# Altium integrated library 0_4R.IntLib: 1 symbol
Pins are listed as number, name and electrical type; pins without a type are passive.

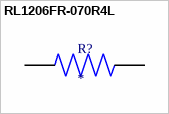
[diagram p0: symbol RL1206FR-070R4L]

## RL1206FR-070R4L
designator R?
400 mOhms Â±1% 0.25W, 1/4W Chip Resistor 1206 (3216 Metric) Automotive AEC-Q200, Current Sense, Moisture Resistant Thick Film; MF: Yageo; MP: RL1206FR-070R4L; SnapEDA_Link: https://www.snapeda.com/parts/RL1206FR-070R4L/Yageo/view-part/?ref=snap; Package: 3116 Yageo; Value: *; Check_prices: https://www.snapeda.com/parts/RL1206FR-070R4L/Yageo/view-part/?ref=eda
footprint RESC3116X65N
pins: 1, 2